# Altium schematic symbol library SN74LVC1G125DCKR.SchLib: 1 symbol
Pins are listed as number, name and electrical type; pins without a type are passive.

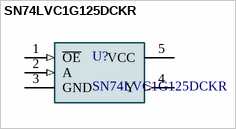
[diagram p0: symbol SN74LVC1G125DCKR]

## SN74LVC1G125DCKR
designator U?
Single Bus Buffer Gate With 3-State Outputs 5-SC70 -40 to 125; MF: Texas Instruments; Package: SOT-SC70-5 Texas Instruments; MP: SN74LVC1G125DCKR; Texas_Instruments-Purchase-URL: https://snapeda.com/shop?store=Texas+Instruments&id=105725; Digi-Key_Part_Number: 296-11604-1-ND; Value: *; SnapEDA_Link: https://www.snapeda.com/parts/SN74LVC1G125DCKR/Texas%20Instruments/view-part/105725/?ref=snap
footprint SN74LVC1G125DCKR (5-SC70)
footprint SN74LVC1G14DBV (5-SOT-23)
pins: 1 ~{OE} (in), 2 A (in), 3 GND (power), 4 Y (out), 5 VCC (power)